# Altium footprint library bs_libs.PcbLib: 125 footprints (part 4 of 8)
Each footprint in its own frame and in the unit in brackets; x right, y up, seen from the top. Pads: shape width x height; smd on the part's side, far side on the other; paste and mask are expansions set on the pad; w line width, h text height; cw(c..) or ccw(c..) is an arc to the next point about the centre after c.
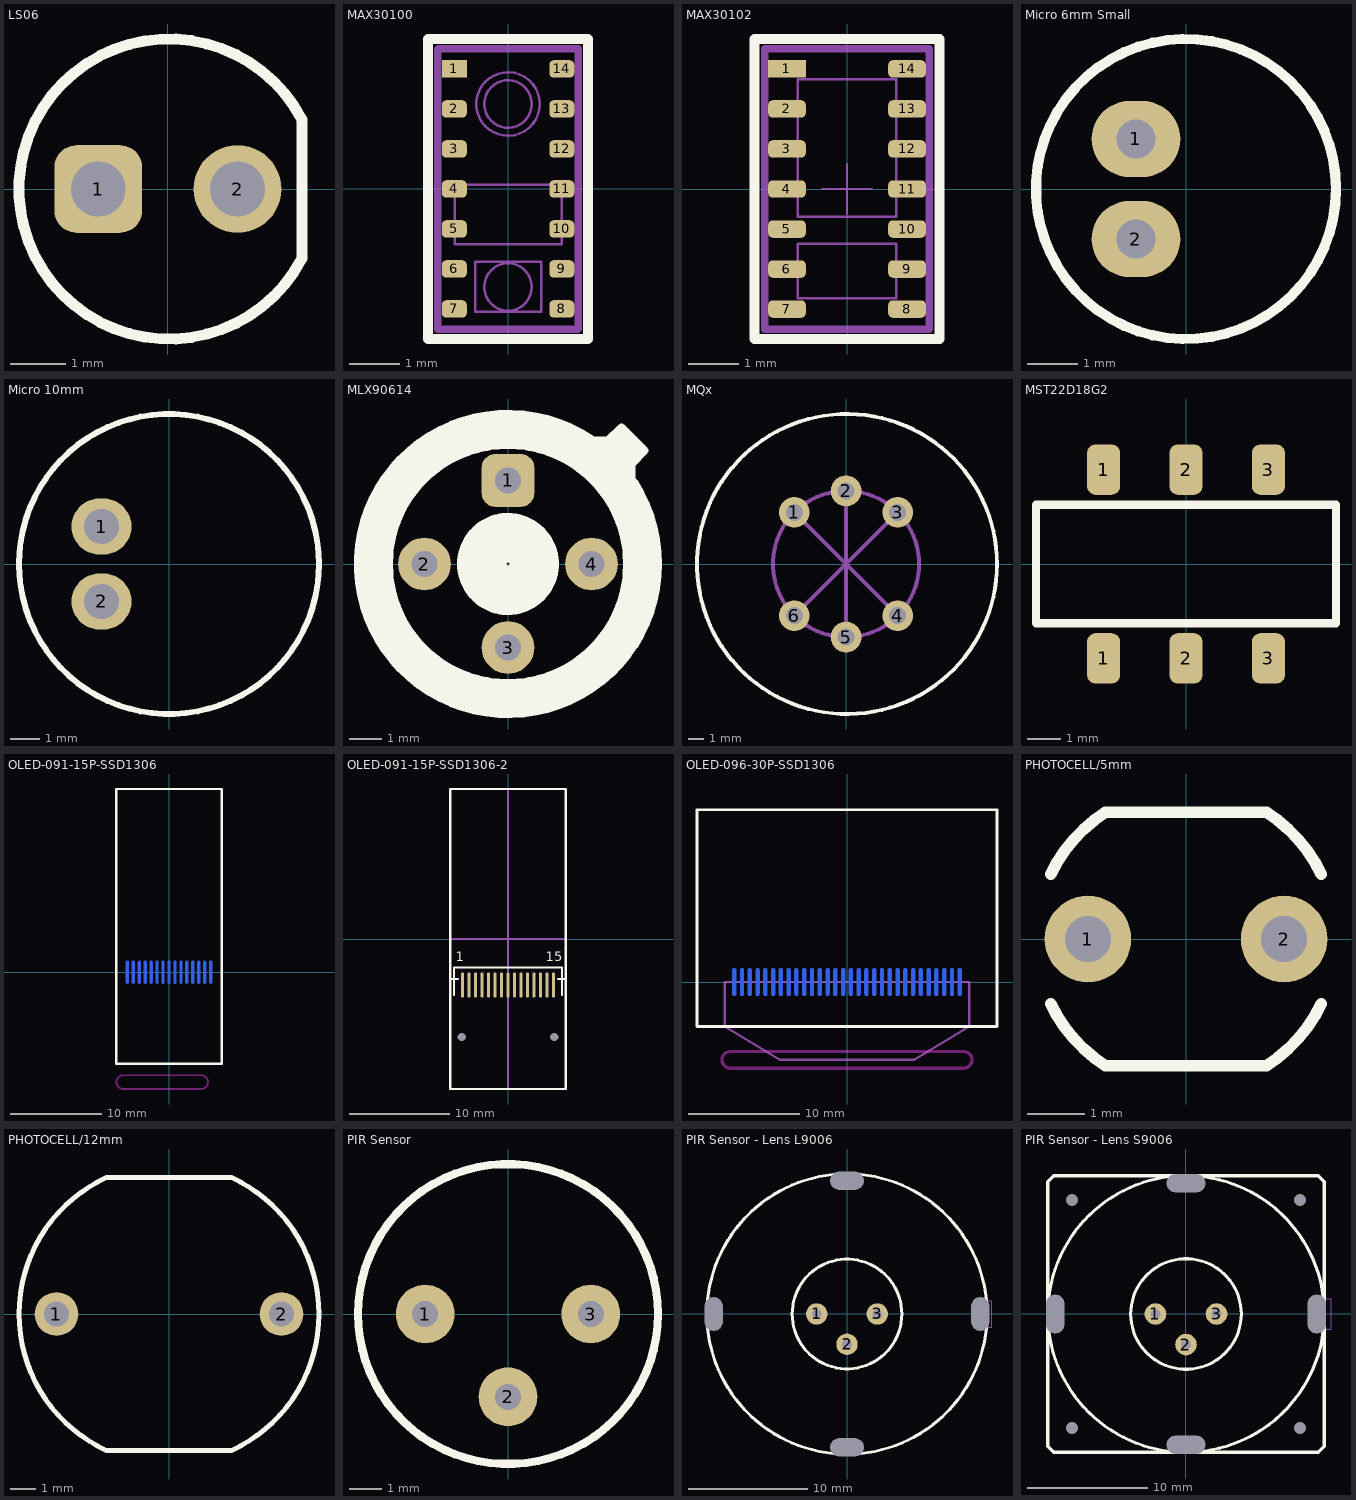
[diagram p3: the footprints below, top view; thin cyan lines are the x and y axes]

## LS06 [mm]
pads (2):
  rrect50% 1.6x1.6 hole 1: 1(-1.27,0)
  round 1.6 hole 1: 2(1.27,0)
Top Overlay:
  lines w0.2: 2.44,-1.27 cw(c0.019,0) 2.44,1.27 2.44,-1.27
3D body "User Library-LED5mm_120a.step": height 4.8, standoff -5, extent -2.9,-2.9 2.4,2.9

## MAX30100 [mm]
pads (14):
  rect 0.5x0.35 smd: 1(-1.075,2.4)
  rrect50% 0.5x0.35 smd: 2(-1.075,1.6) 3(-1.075,0.8) 4(-1.075,0) 5(-1.075,-0.8) 6(-1.075,-1.6) 7(-1.075,-2.4) 8(1.075,-2.4) 9(1.075,-1.6) 10(1.075,-0.8) 11(1.075,0) 12(1.075,0.8) 13(1.075,1.6) 14(1.075,2.4)
Top Overlay:
  lines w0.2: -1.6,-3 -1.6,-3 ; -1.6,-3 -1.6,3 1.6,3 1.6,-3 ; -1.6,-3 1.6,-3 ; 1.6,-3 1.6,-3
Mechanical 1:
  circle w0.05: c0,-1.96 r0.475
  circle w0.05: c0,1.7 r0.475
  circle w0.05: c0,1.7 r0.635
  lines w0.05: -1.07,-1.105 1.07,-1.105 1.07,0.085 -1.07,0.085 -1.07,-1.105 ; -0.66,-2.46 -0.66,-1.46 0.66,-1.46 0.66,-2.46 -0.66,-2.46
  lines w0.15: 1.4,-2.8 1.4,2.8 -1.4,2.8 -1.4,-2.8 1.4,-2.8 ; 1.4,-2.8 1.4,-2.8
3D body "User Library-MAX30100.STEP": height 1.28, standoff 0, extent -1.4,-2.8 1.4,2.8

## MAX30102 [mm]
pads (14):
  rect 0.75x0.35 smd: 1(-1.2,2.4)
  rrect50% 0.75x0.35 smd: 2(-1.2,1.6) 3(-1.2,0.8) 4(-1.2,0) 5(-1.2,-0.8) 6(-1.2,-1.6) 7(-1.2,-2.4) 8(1.2,-2.4) 9(1.2,-1.6) 10(1.2,-0.8) 11(1.2,0) 12(1.2,0.8) 13(1.2,1.6) 14(1.2,2.4)
Top Overlay:
  lines w0.2: -1.85,-3 -1.85,3 1.85,3 1.85,-3 -1.85,-3
Mechanical 1:
  lines w0.05: -0.5,0 0.5,0 ; 0,-0.5 0,0.5 ; -0.985,-2.187 0.985,-2.187 0.985,-1.093 -0.985,-1.093 -0.985,-2.187 ; -0.985,-0.553 0.985,-0.553 0.985,2.197 -0.985,2.197 -0.985,-0.553
  lines w0.15: -1.65,-2.8 -1.65,2.8 1.65,2.8 1.65,-2.8 -1.65,-2.8
3D body "User Library-MAX30100.STEP": height 1.28, standoff 0, extent -1.4,-2.8 1.4,2.8

## Micro 6mm Small [mil]
pads (2):
  oval 70x60 hole 31: 1(-39.37,39.37) 2(-39.37,-39.37)
Top Overlay:
  circle w8: c0,0 r118.11

## Micro 10mm [mil]
pads (2):
  oval 80x75 hole 47.24: 1(-90,50) 2(-90,-50)
Top Overlay:
  circle w8: c0,0 r200
3D body "cma-6542pf.stp": height 263.78, standoff -177.17, extent -190.94,-190.94 190.95,190.95

## MLX90614 [mm]
pads (4):
  rrect50% 1.6x1.6 hole 0.8: 1(0,2.54)
  round 1.6 hole 0.8: 2(-2.54,0) 3(0,-2.54) 4(2.54,0)
Top Overlay:
  circle w1.5: c0,0 r0.8
  circle w0.254: c0,0 r4.56
  circle w1: c0,0 r4
  region: 2.616,3.748 3.048,3.748 3.451,4.151 4.151,3.451 3.748,3.048 3.748,2.616
  lines w0.254: 2.616,3.748 3.048,3.748 3.451,4.151 4.151,3.451 3.748,3.048 3.748,2.616
3D body "User Library-MLX90614.step": height 4.05, standoff -2, extent -6.54,-6.54 7.07,7.07

## MQx [mm] "Cam bien gas"
height 5
pads (6):
  round 2 hole 1.1: 1(-3.359,3.359) 2(0,4.75) 3(3.359,3.359) 4(3.359,-3.359) 5(0,-4.75) 6(-3.359,-3.359)
Top Overlay:
  circle w0.254: c0.064,0 r9.75
Mechanical 1:
  circle w0.254: c0,0 r4.75
  lines w0.254: -3.359,-3.359 3.359,3.359 ; -3.359,3.359 3.359,-3.359 ; 0,-4.75 0,4.75
3D body "User Library-MQ-5.step": height 16.06, standoff -7, extent -9.5,-9.5 9.5,9.5

## MST22D18G2 [mm]
pads (6):
  rrect50% 1x1.525 smd: 1(-2.5,-2.863) 1(-2.5,2.863) 2(0,-2.863) 2(0,2.863) 3(2.5,-2.863) 3(2.5,2.863)
Top Overlay:
  lines w0.254: -4.55,-1.8 4.55,-1.8 4.55,1.8 -4.55,1.8 -4.55,-1.8
3D body "MSS-12D16.STEP": height 5.5, standoff 0, extent -4.5,-1.8 4.5,1.8

## OLED-091-15P-SSD1306 [mm]
pads (15):
  oval 0.3x2.5 smd far side: 1(-4.55,0) 2(-3.9,0) 3(-3.25,0) 4(-2.6,0) 5(-1.95,0) 6(-1.3,0) 7(-0.65,0) 8(0,0) 9(0.65,0) 10(1.3,0) 11(1.95,0) 12(2.6,0) 13(3.25,0) 14(3.9,0) 15(4.55,0)
Top Overlay:
  lines w0.25: -5.75,-10 5.75,-10 5.75,20 -5.75,20 -5.75,-10
Bottom Overlay:
  lines w0.2: -5.4,-1 -5.4,1.75 5.4,1.75 5.4,-1
  text "15" at 5.5,2 h1.6
  text "1" at -5,2 h1.6
Keep-Out Layer:
  lines w0.2: -5,-12.75 cw(c-5,-12) -5,-11.25 3.5,-11.25 cw(c3.5,-12) 3.5,-12.75 -5,-12.75
3D body: height 1.4, standoff 0, extent -5.75,-10 5.75,20
3D body: height 0.8, standoff 0, extent -5.5,-12 4,-9.75
3D body: height 0.8, standoff 0, extent -5.5,-12 5.5,-6

## OLED-091-15P-SSD1306-2 [mm]
pads (17):
  oval 0.3x2.5 smd: 1(-4.55,-4.6) 2(-3.9,-4.6) 3(-3.25,-4.6) 4(-2.6,-4.6) 5(-1.95,-4.6) 6(-1.3,-4.6) 7(-0.65,-4.6) 8(0,-4.6) 9(0.65,-4.6) 10(1.3,-4.6) 11(1.95,-4.6) 12(2.6,-4.6) 13(3.25,-4.6) 14(3.9,-4.6) 15(4.55,-4.6)
  round 0 hole 0.8 unplated: HOLE(-4.625,-9.8) HOLE(4.625,-9.8)
Top Overlay:
  lines w0.2: -5.75,-4 -5,-4 ; -5.4,-5.6 -5.4,-2.85 5.4,-2.85 5.4,-5.6 ; 5,-4 5.75,-4
  lines w0.25: -5.75,-15 -5.75,15 5.75,15 5.75,-15 -5.75,-15
  text "15" at 3.75,-2.6 h1.6
  text "1" at -5.25,-2.6 h1.6
Mechanical 1:
  lines w0.2: -5.75,0 0,0 ; 0,-15 0,0 ; 5.75,0 0,0 ; 0,0 0,0 ; 0,0 0,0 ; 0,0 0,0 ; 0,0 0,15 ; 0,15 0,15
3D body: height 0.8, standoff 0, extent -5.5,-17 5.6,-15
3D body: height 1.4, standoff 0, extent -5.75,-15 5.75,15

## OLED-096-30P-SSD1306 [mm]
pads (30):
  oval 0.35x2.5 smd far side: 1(-10.15,0) 2(-9.45,0) 3(-8.75,0) 4(-8.05,0) 5(-7.35,0) 6(-6.65,0) 7(-5.95,0) 8(-5.25,0) 9(-4.55,0) 10(-3.85,0) 11(-3.15,0) 12(-2.45,0) 13(-1.75,0) 14(-1.05,0) 15(-0.35,0) 16(0.35,0) 17(1.05,0) 18(1.75,0) 19(2.45,0) 20(3.15,0) 21(3.85,0) 22(4.55,0) 23(5.25,0) 24(5.95,0) 25(6.65,0) 26(7.35,0) 27(8.05,0) 28(8.75,0) 29(9.45,0) 30(10.15,0)
Top Overlay:
  lines w0.25: -13.5,-4 -13.5,15.5 13.5,15.5 13.5,-4 -13.5,-4
Bottom Overlay:
  lines w0.2: -11,-1 -11,1.75 11,1.75 11,-1
  text "30" at 11,2 h1.6
  text "1" at -10.5,2 h1.6
Keep-Out Layer:
  lines w0.3: -10.5,-7.75 cw(c-10.5,-7) -10.5,-6.25 10.5,-6.25 cw(c10.5,-7) 10.5,-7.75 -10.5,-7.75
Mechanical 5:
  lines w0.2: -6,-7 0,-7 6,-7 ; -6,-7 -11,-4 -11,0 0,0 11,0 11,-4 6,-7 ; -6,-7 6,-7
3D body: height 1.4, standoff 0, extent -13.25,-3.75 13.25,15.25
3D body: height 0.8, standoff 0, extent -6,-7 6,-3.75
3D body: height 0.8, standoff 0, extent -11,-7 11,0

## PHOTOCELL/5mm [mm] "Photoresistor"
pads (2):
  round 1.5 hole 0.8: 1(-1.7,0) 2(1.7,0)
Top Overlay:
  lines w0.2: -2.346,-1.122 ccw(c0,0) -1.396,-2.194 ; -2.346,1.122 cw(c0,0) -1.396,2.194 ; -1.4,-2.2 1.4,-2.2 ; -1.4,2.2 1.4,2.2 ; 1.396,-2.194 ccw(c0,0) 2.346,-1.122 ; 1.396,2.194 cw(c0,0) 2.346,1.122
3D body "User Library-Part7.step": height 2.24, standoff -2.5, extent -2.605,-2.15 2.605,2.15

## PHOTOCELL/12mm [mm] "Photoresistor"
pads (2):
  round 1.75 hole 1: 1(-4.5,0) 2(4.5,0)
Top Overlay:
  lines w0.2: -6,0 cw(c0,0) -2.483,5.462 2.483,5.462 cw(c0,0) 6,0 cw(c0,0) 2.483,-5.462 -2.483,-5.462 cw(c0,0) -6,0
3D body "User Library-PDV-P5001.STEP": height 2.93, standoff -35.95, extent -5.625,-4.775 5.625,4.775

## PIR Sensor [mm]
pads (3):
  round 1.8 hole 0.8: 1(-2.54,0) 2(0,-2.54) 3(2.54,0)
Top Overlay:
  circle w0.254: c0,0 r4.6
3D body "User Library-PIR_S_Orginal.step": height 4.7, standoff -2, extent -4.55,-4.55 4.55,4.52

## PIR Sensor - Lens L9006 [mm]
pads (7):
  round 1.8 hole 0.8: 1(-2.54,0) 2(0,-2.54) 3(2.54,0)
  round 0 hole 1.5 slot 2.8 at 90 deg: L1(-11.176,0) L3(11.176,0)
  round 0 hole 1.5 slot 2.8 at 0 deg: L2(0,-11.176) L4(0,11.176)
Top Overlay:
  circle w0.254: c0,0 r4.6
  circle w0.254: c0,0 r11.75
Mechanical 1:
  lines w0.025: 11.75,-1.1 11.75,0 ; 11.75,1.1 11.75,0 ; 10.95,0 10.95,1.1 12.15,1.1 12.15,-1.1 10.95,-1.1 10.95,0 ; 10.95,0 11.75,0
3D body "User Library-PIR_S_Orginal.step": height 4.7, standoff -2, extent -4.55,-4.55 4.55,4.52

## PIR Sensor - Lens S9006 [mm]
pads (11):
  round 1.8 hole 0.8: 1(-2.54,0) 2(0,-2.54) 3(2.54,0)
  round 0 hole 1: H1(9.5,9.5) H2(-9.5,9.5) H3(-9.5,-9.5) H4(9.5,-9.5)
  round 0 hole 1.5 slot 3.2 at 90 deg: L1(-10.875,0) L3(10.875,0)
  round 0 hole 1.5 slot 3.2 at 0 deg: L2(0,-10.875) L4(0,10.875)
Top Overlay:
  circle w0.254: c0,0 r11.5
  circle w0.254: c0,0 r4.6
  lines w0.254: -11.5,-11 -11.5,11 -11,11.5 11,11.5 11.5,11 11.5,-11 11,-11.5 -11,-11.5 -11.5,-11
Mechanical 1:
  lines w0.025: 11.5,-1.25 11.5,0 ; 11.5,1.25 11.5,0 ; 10.7,0 10.7,-1.25 12.1,-1.25 12.1,1.25 10.7,1.25 10.7,0 ; 10.7,0 11.5,0
3D body "User Library-PIR_S_Orginal.step": height 4.7, standoff -2, extent -4.55,-4.55 4.55,4.52